# Altium footprint library SOMs.PcbLib: 40 footprints (part 2 of 3)
Each footprint in its own frame and in the unit in brackets; x right, y up, seen from the top. Pads: shape width x height; smd on the part's side, far side on the other; paste and mask are expansions set on the pad; w line width, h text height; cw(c..) or ccw(c..) is an arc to the next point about the centre after c.
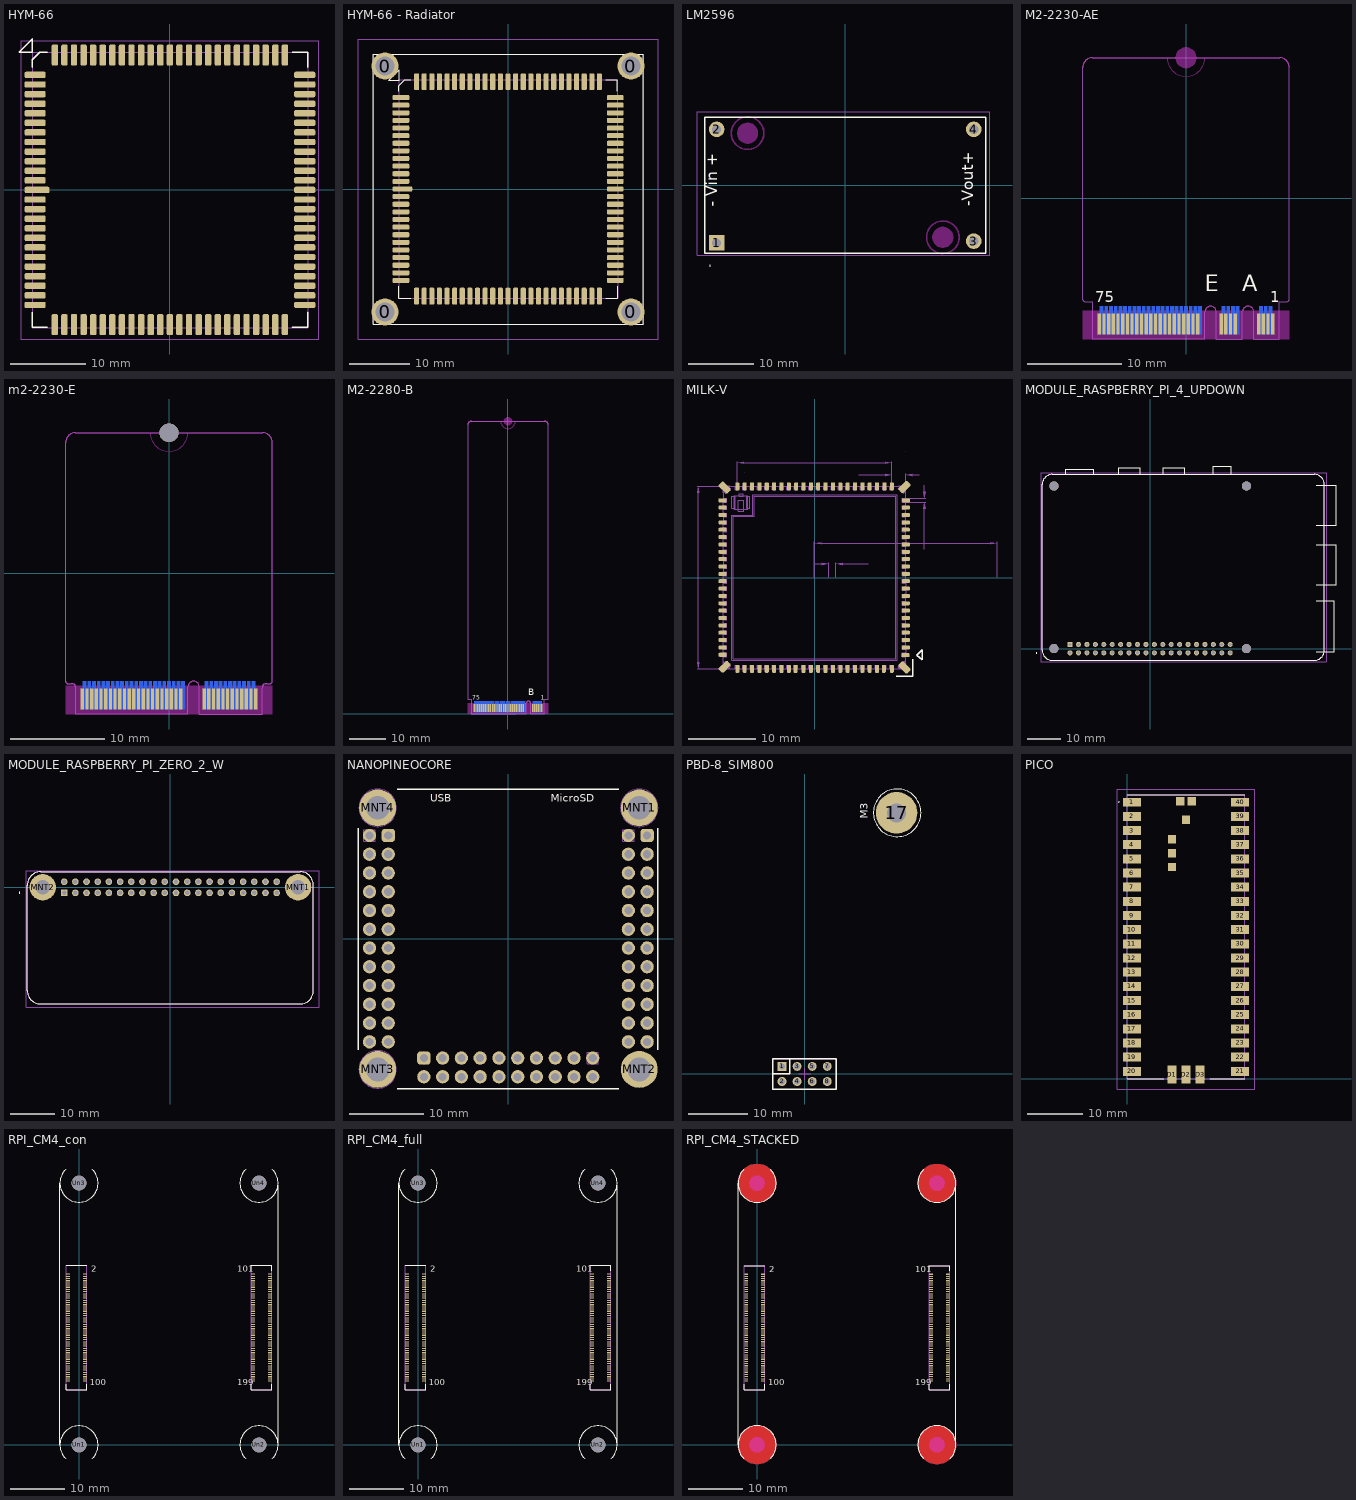
[diagram p1: the footprints below, top view; thin cyan lines are the x and y axes]

## HYM-66 [mm]
height 3.8
pads (100):
  rrect50% 3.3x0.85 smd: 1(-17.6,0)
  rrect50% 2.8x0.85 smd: 2(-17.85,-1.27) 3(-17.85,-2.54) 4(-17.85,-3.81) 5(-17.85,-5.08) 6(-17.85,-6.35) 7(-17.85,-7.62) 8(-17.85,-8.89) 9(-17.85,-10.16) 10(-17.85,-11.43) 11(-17.85,-12.7) 12(-17.85,-13.97) 13(-17.85,-15.24) 39(17.875,-15.24) 40(17.875,-13.97) 41(17.875,-12.7) 42(17.875,-11.43) 43(17.875,-10.16) 44(17.875,-8.89) 45(17.875,-7.62) 46(17.875,-6.35) 47(17.875,-5.08) 48(17.875,-3.81) 49(17.875,-2.54) 50(17.875,-1.27) 51(17.875,0) 52(17.875,1.27) 53(17.875,2.54) 54(17.875,3.81) 55(17.875,5.08) 56(17.875,6.35) 57(17.875,7.62) 58(17.875,8.89) 59(17.875,10.16) 60(17.875,11.43) 61(17.875,12.7) 62(17.875,13.97) 63(17.875,15.24) 89(-17.85,15.24) 90(-17.85,13.97) 91(-17.85,12.7) 92(-17.85,11.43) 93(-17.85,10.16) 94(-17.85,8.89) 95(-17.85,7.62) 96(-17.85,6.35) 97(-17.85,5.08) 98(-17.85,3.81) 99(-17.85,2.54) 100(-17.85,1.27)
  rrect50% 0.85x2.8 smd: 14(-15.24,-17.85) 15(-13.97,-17.85) 16(-12.7,-17.85) 17(-11.43,-17.85) 18(-10.16,-17.85) 19(-8.89,-17.85) 20(-7.62,-17.85) 21(-6.35,-17.85) 22(-5.08,-17.85) 23(-3.81,-17.85) 24(-2.54,-17.85) 25(-1.27,-17.85) 26(0,-17.85) 27(1.27,-17.85) 28(2.54,-17.85) 29(3.81,-17.85) 30(5.08,-17.85) 31(6.35,-17.85) 32(7.62,-17.85) 33(8.89,-17.85) 34(10.16,-17.85) 35(11.43,-17.85) 36(12.7,-17.85) 37(13.97,-17.85) 38(15.24,-17.85) 64(15.24,17.875) 65(13.97,17.875) 66(12.7,17.875) 67(11.43,17.875) 68(10.16,17.875) 69(8.89,17.875) 70(7.62,17.875) 71(6.35,17.875) 72(5.08,17.875) 73(3.81,17.875) 74(2.54,17.875) 75(1.27,17.875) 76(0,17.875) 77(-1.27,17.875) 78(-2.54,17.875) 79(-3.81,17.875) 80(-5.08,17.875) 81(-6.35,17.875) 82(-7.62,17.875) 83(-8.89,17.875) 84(-10.16,17.875) 85(-11.43,17.875) 86(-12.7,17.875) 87(-13.97,17.875) 88(-15.24,17.875)
Top Overlay:
  lines w0.2: -18.225,-16.225 -18.225,-18.225 -16.225,-18.225 ; -18.225,16.275 -18.225,17.25 -17.225,18.25 -16.25,18.25 ; 16.25,-18.225 18.25,-18.225 18.25,-16.225 ; 16.25,18.25 18.25,18.25 18.25,16.25 ; -19.975,18.25 -18.225,20 -18.225,18.25 -19.975,18.25
Top Assembly:
  lines w0.1: -18.25,-18.25 18.25,-18.25 18.25,18.25 -18.25,18.25 -18.25,-18.25
Top Courtyard:
  lines w0.1: -19.75,-19.75 19.75,-19.75 19.75,19.75 -19.75,19.75 -19.75,-19.75

## HYM-66 - Radiator [mm]
height 3.8
pads (104):
  round 4.5 hole 3.2: 0(-20.5,-20.5) 0(-20.5,20.5) 0(20.5,-20.5) 0(20.5,20.5)
  rrect50% 3.3x0.85 smd: 1(-17.6,0)
  rrect50% 2.8x0.85 smd: 2(-17.85,-1.27) 3(-17.85,-2.54) 4(-17.85,-3.81) 5(-17.85,-5.08) 6(-17.85,-6.35) 7(-17.85,-7.62) 8(-17.85,-8.89) 9(-17.85,-10.16) 10(-17.85,-11.43) 11(-17.85,-12.7) 12(-17.85,-13.97) 13(-17.85,-15.24) 39(17.875,-15.24) 40(17.875,-13.97) 41(17.875,-12.7) 42(17.875,-11.43) 43(17.875,-10.16) 44(17.875,-8.89) 45(17.875,-7.62) 46(17.875,-6.35) 47(17.875,-5.08) 48(17.875,-3.81) 49(17.875,-2.54) 50(17.875,-1.27) 51(17.875,0) 52(17.875,1.27) 53(17.875,2.54) 54(17.875,3.81) 55(17.875,5.08) 56(17.875,6.35) 57(17.875,7.62) 58(17.875,8.89) 59(17.875,10.16) 60(17.875,11.43) 61(17.875,12.7) 62(17.875,13.97) 63(17.875,15.24) 89(-17.85,15.24) 90(-17.85,13.97) 91(-17.85,12.7) 92(-17.85,11.43) 93(-17.85,10.16) 94(-17.85,8.89) 95(-17.85,7.62) 96(-17.85,6.35) 97(-17.85,5.08) 98(-17.85,3.81) 99(-17.85,2.54) 100(-17.85,1.27)
  rrect50% 0.85x2.8 smd: 14(-15.24,-17.85) 15(-13.97,-17.85) 16(-12.7,-17.85) 17(-11.43,-17.85) 18(-10.16,-17.85) 19(-8.89,-17.85) 20(-7.62,-17.85) 21(-6.35,-17.85) 22(-5.08,-17.85) 23(-3.81,-17.85) 24(-2.54,-17.85) 25(-1.27,-17.85) 26(0,-17.85) 27(1.27,-17.85) 28(2.54,-17.85) 29(3.81,-17.85) 30(5.08,-17.85) 31(6.35,-17.85) 32(7.62,-17.85) 33(8.89,-17.85) 34(10.16,-17.85) 35(11.43,-17.85) 36(12.7,-17.85) 37(13.97,-17.85) 38(15.24,-17.85) 64(15.24,17.875) 65(13.97,17.875) 66(12.7,17.875) 67(11.43,17.875) 68(10.16,17.875) 69(8.89,17.875) 70(7.62,17.875) 71(6.35,17.875) 72(5.08,17.875) 73(3.81,17.875) 74(2.54,17.875) 75(1.27,17.875) 76(0,17.875) 77(-1.27,17.875) 78(-2.54,17.875) 79(-3.81,17.875) 80(-5.08,17.875) 81(-6.35,17.875) 82(-7.62,17.875) 83(-8.89,17.875) 84(-10.16,17.875) 85(-11.43,17.875) 86(-12.7,17.875) 87(-13.97,17.875) 88(-15.24,17.875)
Top Overlay:
  lines w0.2: -18.225,-16.225 -18.225,-18.225 -16.225,-18.225 ; -18.225,16.275 -18.225,17.25 -17.225,18.25 -16.25,18.25 ; 16.25,-18.225 18.25,-18.225 18.25,-16.225 ; 16.25,18.25 18.25,18.25 18.25,16.25 ; -22.5,-22.5 22.5,-22.5 22.5,22.5 -22.5,22.5 -22.5,-22.5 ; -19.875,18.15 -18.125,19.9 -18.125,18.15 -19.875,18.15
Top Assembly:
  lines w0.1: -25,-25 -25,25 25,25 25,-25 -25,-25 ; -18.25,-18.25 18.25,-18.25 18.25,18.25 -18.25,18.25 -18.25,-18.25
  text "50x50 FAN" at 17.83,23.343 h2
Top Courtyard:
  lines w0.1: -22.5,-22.5 22.5,-22.5 22.5,22.5 -22.5,22.5 -22.5,-22.5

## LM2596 [mm] "DC-DC Module, 3A"
height 9
pads (4):
  rect 2.4x2.4 hole 1.4: 1(-19.75,-8.858)
  round 2.4 hole 1.4: 2(-19.75,8.58) 3(19.75,-8.58) 4(19.75,8.58)
Top Overlay:
  lines w0.1: -20.77,-12.43 ccw(c-20.77,-12.38) -20.77,-12.33 ccw(c-20.77,-12.38) -20.77,-12.43
  lines w0.2: -21.6,-10.414 -21.6,10.414 21.6,10.414 21.6,-10.414 -21.6,-10.414
  text "-Vout+" at 20.32,-3.213 h3
  text "- Vin +" at -19.05,-3.284 h3
Keep-Out Layer:
  board cut-out: -15,6.4 -15.158,6.4 -15.467,6.461 -15.758,6.582 -16.02,6.757 -16.243,6.98 -16.418,7.242 -16.539,7.533 -16.6,7.842 -16.6,8 -16.6,8.158 -16.539,8.467 -16.418,8.758 -16.243,9.02 -16.02,9.243 -15.758,9.418 -15.467,9.539 -15.158,9.6 -15,9.6 -14.842,9.6 -14.533,9.539 -14.242,9.418 -13.98,9.243 -13.757,9.02 -13.582,8.758 -13.461,8.467 -13.4,8.158 -13.4,8 -13.4,7.842 -13.461,7.533 -13.582,7.242 -13.757,6.98 -13.98,6.757 -14.242,6.582 -14.533,6.461 -14.842,6.4
  board cut-out: 15,-9.6 14.842,-9.6 14.533,-9.539 14.242,-9.418 13.98,-9.243 13.757,-9.02 13.582,-8.758 13.461,-8.467 13.4,-8.158 13.4,-8 13.4,-7.842 13.461,-7.533 13.582,-7.242 13.757,-6.98 13.98,-6.757 14.242,-6.582 14.533,-6.461 14.842,-6.4 15,-6.4 15.158,-6.4 15.467,-6.461 15.758,-6.582 16.02,-6.757 16.243,-6.98 16.418,-7.242 16.539,-7.533 16.6,-7.842 16.6,-8 16.6,-8.158 16.539,-8.467 16.418,-8.758 16.243,-9.02 16.02,-9.243 15.758,-9.418 15.467,-9.539 15.158,-9.6
Keep-Out Layer:
  circle w0.254: c-15,8 r2.5
  circle w0.254: c15,-8 r2.5
Mechanical 13:
  lines w0.1: 14.79,11.27 -22.77,11.27 -22.77,-10.73 22.24,-10.73 ; 22.23,-10.73 22.23,11.27
Mechanical 15:
  lines w0.1: 22.23,-10.73 22.23,10.28 22.23,10.27 22.23,11.27 -22.77,11.27 -22.77,-10.73 22.24,-10.73
3D body "LM2596 DC to DC Buck Converter 3 A.STEP": height 13.35, standoff -1.8, extent -21.6,-10.625 21.6,10.625

## M2-2230-AE [mm] "UNTESTED m.2 2230 type E"
height 3
pads (59):
  rect 0.35x2.2 smd: 1(9.25,-13.4) 3(8.75,-13.4) 5(8.25,-13.4) 7(7.75,-13.4) 17(5.25,-13.4) 19(4.75,-13.4) 21(4.25,-13.4) 23(3.75,-13.4) 33(1.25,-13.4) 35(0.75,-13.4) 37(0.25,-13.4) 39(-0.25,-13.4) 41(-0.75,-13.4) 43(-1.25,-13.4) 45(-1.75,-13.4) 47(-2.25,-13.4) 49(-2.75,-13.4) 51(-3.25,-13.4) 53(-3.75,-13.4) 55(-4.25,-13.4) 57(-4.75,-13.4) 59(-5.25,-13.4) 61(-5.75,-13.4) 63(-6.25,-13.4) 65(-6.75,-13.4) 67(-7.25,-13.4) 69(-7.75,-13.4) 71(-8.25,-13.4) 73(-8.75,-13.4) 75(-9.25,-13.4)
  rect 0.35x3 smd far side: 2(9,-13) 4(8.5,-13) 6(8,-13) 16(5.5,-13) 18(5,-13) 20(4.5,-13) 22(4,-13) 32(1.5,-13) 34(1,-13) 36(0.5,-13) 38(0,-13) 40(-0.5,-13) 42(-1,-13) 44(-1.5,-13) 46(-2,-13) 48(-2.5,-13) 50(-3,-13) 52(-3.5,-13) 54(-4,-13) 56(-4.5,-13) 58(-5,-13) 60(-5.5,-13) 62(-6,-13) 64(-6.5,-13) 66(-7,-13) 68(-7.5,-13) 70(-8,-13) 72(-8.5,-13) 74(-9,-13)
Top Overlay:
  text "75" at -9.7,-11.5 h2
  text "1" at 9,-11.5 h2
  text "E" at 2,-10.5 h3
  text "A" at 6,-10.5 h3
Top Solder:
  region: -11,-15 -11,-12 11,-12 11,-15
  region: 2.025,-15 -9.925,-15 -9.925,-14.7 2.025,-14.7
  region: 9.925,-15 3.225,-15 3.225,-14.7 9.925,-14.7
Bottom Solder:
  region: -11,-15 -11,-12 11,-12 11,-15
  region: 2.025,-15 -9.925,-15 -9.925,-14.7 2.025,-14.7
  region: 9.925,-15 3.225,-15 3.225,-14.7 9.925,-14.7
Keep-Out Layer:
  board cut-out: 0,13.9 -0.108,13.9 -0.321,13.942 -0.521,14.025 -0.701,14.146 -0.854,14.299 -0.975,14.479 -1.058,14.679 -1.1,14.892 -1.1,15 -1.1,15.108 -1.058,15.321 -0.975,15.521 -0.854,15.701 -0.701,15.854 -0.521,15.975 -0.321,16.058 -0.108,16.1 0,16.1 0.108,16.1 0.321,16.058 0.521,15.975 0.701,15.854 0.854,15.701 0.975,15.521 1.058,15.321 1.1,15.108 1.1,15 1.1,14.892 1.058,14.679 0.975,14.479 0.854,14.299 0.701,14.146 0.521,14.025 0.321,13.942 0.108,13.9
Keep-Out Layer:
  region: -11,-12 11,-12 11,-15 -11,-15
  lines w0.1: -11,14 cw(c-10,14) -10,15 0,15 10,15 cw(c10,14) 11,14 ; -9.925,-12.25 -9.925,-15 2.025,-15 2.025,-12.1 cw(c2.625,-12.1) 3.225,-12.1 3.225,-15 ; -2,15 ccw(c0,15) 2,15 ; 6.025,-15 6.025,-12.1 cw(c6.625,-12.1) 7.225,-12.1 7.225,-15 ; 9.925,-15 9.925,-12.25
Mechanical 1:
  lines w0.1: -11,-10.8 ccw(c-10.8,-10.8) -10.8,-11 -9.925,-11 -9.925,-15 2.025,-15 2.025,-12.1 cw(c2.625,-12.1) 3.225,-12.1 3.225,-15 6.025,-15 6.025,-12.1 cw(c6.625,-12.1) 7.225,-12.1 7.225,-15 9.925,-15 9.925,-11 10.8,-11 ccw(c10.8,-10.8) 11,-10.8 11,14 ccw(c10,14) 10,15 0,15 -10,15 ccw(c-10,14) -11,14 -11,-10.8

## m2-2230-E [mm] "UNTESTED m.2 2230 type E"
height 3
pads (67):
  rect 0.35x2.2 smd: 1(9.25,-13.4) 3(8.75,-13.4) 5(8.25,-13.4) 7(7.75,-13.4) 9(7.25,-13.4) 11(6.75,-13.4) 13(6.25,-13.4) 15(5.75,-13.4) 17(5.25,-13.4) 19(4.75,-13.4) 21(4.25,-13.4) 23(3.75,-13.4) 33(1.25,-13.4) 35(0.75,-13.4) 37(0.25,-13.4) 39(-0.25,-13.4) 41(-0.75,-13.4) 43(-1.25,-13.4) 45(-1.75,-13.4) 47(-2.25,-13.4) 49(-2.75,-13.4) 51(-3.25,-13.4) 53(-3.75,-13.4) 55(-4.25,-13.4) 57(-4.75,-13.4) 59(-5.25,-13.4) 61(-5.75,-13.4) 63(-6.25,-13.4) 65(-6.75,-13.4) 67(-7.25,-13.4) 69(-7.75,-13.4) 71(-8.25,-13.4) 73(-8.75,-13.4) 75(-9.25,-13.4)
  rect 0.35x3 smd far side: 2(9,-13) 4(8.5,-13) 6(8,-13) 8(7.5,-13) 10(7,-13) 12(6.5,-13) 14(6,-13) 16(5.5,-13) 18(5,-13) 20(4.5,-13) 22(4,-13) 32(1.5,-13) 34(1,-13) 36(0.5,-13) 38(0,-13) 40(-0.5,-13) 42(-1,-13) 44(-1.5,-13) 46(-2,-13) 48(-2.5,-13) 50(-3,-13) 52(-3.5,-13) 54(-4,-13) 56(-4.5,-13) 58(-5,-13) 60(-5.5,-13) 62(-6,-13) 64(-6.5,-13) 66(-7,-13) 68(-7.5,-13) 70(-8,-13) 72(-8.5,-13) 74(-9,-13)
via 0,15 diameter 2 hole 2
Top Solder:
  region: -11,-15 -11,-12 11,-12 11,-15
  region: 2.025,-15 -9.925,-15 -9.925,-14.7 2.025,-14.7
  region: 9.925,-15 3.225,-15 3.225,-14.7 9.925,-14.7
Bottom Solder:
  region: -11,-15 -11,-12 11,-12 11,-15
  region: 2.025,-15 -9.925,-15 -9.925,-14.7 2.025,-14.7
  region: 9.925,-15 3.225,-15 3.225,-14.7 9.925,-14.7
Keep-Out Layer:
  region: -11,-12 11,-12 11,-15 -11,-15
  lines w0.1: -2,15 ccw(c0,15) 2,15 ; -11,-11.55 ccw(c-10.8,-11.55) -10.8,-11.75 -10.425,-11.75 cw(c-10.425,-12.25) -9.925,-12.25 -9.925,-15 2.025,-15 2.025,-12.1 cw(c2.625,-12.1) 3.225,-12.1 3.225,-15 9.925,-15 9.925,-12.25 cw(c10.425,-12.25) 10.425,-11.75 10.8,-11.75 ccw(c10.8,-11.55) 11,-11.55 11,14 ccw(c10,14) 10,15 0,15 -10,15 ccw(c-10,14) -11,14 -11,-11.55
Mechanical 1:
  lines w0.1: -11,-11.55 ccw(c-10.8,-11.55) -10.8,-11.75 -10.425,-11.75 cw(c-10.425,-12.25) -9.925,-12.25 -9.925,-15 2.025,-15 2.025,-12.1 cw(c2.625,-12.1) 3.225,-12.1 3.225,-15 9.925,-15 9.925,-12.25 cw(c10.425,-12.25) 10.425,-11.75 10.8,-11.75 ccw(c10.8,-11.55) 11,-11.55 11,14 ccw(c10,14) 10,15 0,15 -10,15 ccw(c-10,14) -11,14 -11,-11.55

## M2-2280-B [mm] "m.2 2280 type B"
height 3
pads (67):
  rect 0.35x2.2 smd: 1(9.25,1.6) 3(8.75,1.6) 5(8.25,1.6) 7(7.75,1.6) 9(7.25,1.6) 11(6.75,1.6) 21(4.25,1.6) 23(3.75,1.6) 25(3.25,1.6) 27(2.75,1.6) 29(2.25,1.6) 31(1.75,1.6) 33(1.25,1.6) 35(0.75,1.6) 37(0.25,1.6) 39(-0.25,1.6) 41(-0.75,1.6) 43(-1.25,1.6) 45(-1.75,1.6) 47(-2.25,1.6) 49(-2.75,1.6) 51(-3.25,1.6) 53(-3.75,1.6) 55(-4.25,1.6) 57(-4.75,1.6) 59(-5.25,1.6) 61(-5.75,1.6) 63(-6.25,1.6) 65(-6.75,1.6) 67(-7.25,1.6) 69(-7.75,1.6) 71(-8.25,1.6) 73(-8.75,1.6) 75(-9.25,1.6)
  rect 0.35x3 smd far side: 2(9,2) 4(8.5,2) 6(8,2) 8(7.5,2) 10(7,2) 20(4.5,2) 22(4,2) 24(3.5,2) 26(3,2) 28(2.5,2) 30(2,2) 32(1.5,2) 34(1,2) 36(0.5,2) 38(0,2) 40(-0.5,2) 42(-1,2) 44(-1.5,2) 46(-2,2) 48(-2.5,2) 50(-3,2) 52(-3.5,2) 54(-4,2) 56(-4.5,2) 58(-5,2) 60(-5.5,2) 62(-6,2) 64(-6.5,2) 66(-7,2) 68(-7.5,2) 70(-8,2) 72(-8.5,2) 74(-9,2)
Top Overlay:
  text "B" at 5.5,4.5 h3
  text "1" at 9,3.5 h2
  text "75" at -9.7,3.5 h2
Top Solder:
  region: 9.925,0 3.225,0 3.225,0.3 9.925,0.3
  region: 2.025,0 -9.925,0 -9.925,0.3 2.025,0.3
  region: -11,0 -11,3 11,3 11,0
Bottom Solder:
  region: 9.925,0 3.225,0 3.225,0.3 9.925,0.3
  region: 2.025,0 -9.925,0 -9.925,0.3 2.025,0.3
  region: -11,0 -11,3 11,3 11,0
Keep-Out Layer:
  board cut-out: 0,78.9 -0.108,78.9 -0.321,78.942 -0.521,79.025 -0.701,79.146 -0.854,79.299 -0.975,79.479 -1.058,79.679 -1.1,79.892 -1.1,80 -1.1,80.108 -1.058,80.321 -0.975,80.521 -0.854,80.701 -0.701,80.854 -0.521,80.975 -0.321,81.058 -0.108,81.1 0,81.1 0.108,81.1 0.321,81.058 0.521,80.975 0.701,80.854 0.854,80.701 0.975,80.521 1.058,80.321 1.1,80.108 1.1,80 1.1,79.892 1.058,79.679 0.975,79.479 0.854,79.299 0.701,79.146 0.521,79.025 0.321,78.942 0.108,78.9
Keep-Out Layer:
  region: -11,3 11,3 11,0 -11,0
  lines w0.1: -11,79 cw(c-10,79) -10,80 0,80 10,80 cw(c10,79) 11,79 ; -9.925,2.75 -9.925,0 2.025,0 ; -2,80 ccw(c0,80) 2,80 ; 9.925,0 9.925,2.75 ; 5.025,2.9 cw(c5.625,2.9) 6.225,2.9 ; 5.025,2.9 cw(c5.625,2.9) 6.225,2.9 ; 5.025,2.9 5.025,0 5.025,2.9 ; 6.225,2.9 6.225,0 6.225,2.9
Top Assembly:
  lines w0.1: -11,79 -11,4.2 ccw(c-10.8,4.2) -10.8,4 -9.925,4 -9.925,0 2.025,0 5.025,0 5.025,2.9 cw(c5.625,2.9) 6.225,2.9 6.225,0 9.925,0 9.925,4 10.8,4 ccw(c10.8,4.2) 11,4.2 11,79 ; -10.991,79 cw(c-9.991,79) -9.991,80 ; -10,80 10,80 ; 10.009,80 cw(c10.009,79) 11.009,79

## MILK-V [mm]
pads (92):
  rrect50% 1.2x0.6 smd: 1(13.6,-11.6) 2(13.65,-10.45) 3(13.65,-9.35) 4(13.65,-8.25) 5(13.65,-7.15) 6(13.65,-6.05) 7(13.65,-4.95) 8(13.65,-3.85) 9(13.65,-2.75) 10(13.65,-1.65) 11(13.65,-0.55) 12(13.65,0.55) 13(13.65,1.65) 14(13.65,2.75) 15(13.65,3.85) 16(13.65,4.95) 17(13.65,6.05) 18(13.65,7.15) 19(13.65,8.25) 20(13.65,9.35) 21(13.65,10.45) 22(13.65,11.55) 45(-13.75,11.55) 46(-13.75,10.45) 47(-13.75,9.35) 48(-13.75,8.25) 49(-13.75,7.15) 50(-13.75,6.05) 51(-13.75,4.95) 52(-13.75,3.85) 53(-13.75,2.75) 54(-13.75,1.65) 55(-13.75,0.55) 56(-13.75,-0.55) 57(-13.75,-1.65) 58(-13.75,-2.75) 59(-13.75,-3.85) 60(-13.75,-4.95) 61(-13.75,-6.05) 62(-13.75,-7.15) 63(-13.75,-8.25) 64(-13.75,-9.35) 65(-13.75,-10.45) 66(-13.75,-11.55)
  rrect50% 0.6x1.2 smd: 23(11.55,13.65) 24(10.45,13.65) 25(9.35,13.65) 26(8.25,13.65) 27(7.15,13.65) 28(6.05,13.65) 29(4.95,13.65) 30(3.85,13.65) 31(2.75,13.65) 32(1.65,13.65) 33(0.55,13.65) 34(-0.55,13.65) 35(-1.65,13.65) 36(-2.75,13.65) 37(-3.85,13.65) 38(-4.95,13.65) 39(-6.05,13.65) 40(-7.15,13.65) 41(-8.25,13.65) 42(-9.35,13.65) 43(-10.45,13.65) 44(-11.55,13.65) 67(-11.55,-13.65) 68(-10.45,-13.65) 69(-9.35,-13.65) 70(-8.25,-13.65) 71(-7.15,-13.65) 72(-6.05,-13.65) 73(-4.95,-13.65) 74(-3.85,-13.65) 75(-2.85,-13.65) 76(-1.65,-13.65) 77(-0.55,-13.65) 78(0.55,-13.65) 79(1.65,-13.65) 80(2.75,-13.65) 81(3.85,-13.65) 82(4.95,-13.65) 83(6.05,-13.65) 84(7.15,-13.65) 85(8.25,-13.65) 86(9.35,-13.65) 87(10.35,-13.65) 88(11.55,-13.65)
  rrect50% 1.83x1 smd rot 135: 89(13.45,-13.45) 91(-13.45,13.45)
  rrect50% 1.83x1 smd rot 45: 90(13.45,13.55) 92(-13.45,-13.35)
Top Overlay:
  lines w0.2: 12.25,-14.75 14.65,-14.75 14.65,-12.25 ; 15.3,-11.6 16.1,-12.3 16.1,-10.8 15.3,-11.6
Mechanical 1:
  region: 27.287,5.145 26.287,4.979 26.287,5.312
  region: 0.987,4.979 -0.013,5.145 0.987,5.312
  region: 4.187,1.874 3.187,2.041 4.187,2.207
  region: 2.087,2.041 1.087,1.874 1.087,2.207
  lines w0.013: -0.013,0.067 -0.013,5.325 ; 0.087,2.041 1.087,2.041 ; 0.987,5.145 26.287,5.145 ; 2.087,0.067 2.087,2.221 ; 3.187,0.067 3.187,2.221 ; 4.187,2.041 7.993,2.041 ; 27.287,0.067 27.287,5.325
  text "0.1）}" at 7.286,5.372 h1
  text "1.10" at 5.278,2.131 h1
Top Assembly:
  lines w0.2: -13.65,-12.6 -13.65,-13.6 -12.65,-13.6 ; -13.65,12.65 -13.65,13.65 -12.65,13.65 ; 12.55,-13.55 13.55,-12.55 ; 12.6,-13.6 13.6,-13.6 13.6,-12.6 ; 12.6,13.65 13.6,13.65 13.6,12.65
Top Designator:
  drawing of 301 lines, arcs and shapes, not listed
Top Courtyard:
  circle w0.006: c-17.403,-13.645 r0.003
  circle w0.006: c-13.663,13.655 r0.003
  circle w0.006: c-10.463,13.655 r0.003
  circle w0.006: c-11.563,13.655 r0.003
  circle w0.006: c-11.563,13.655 r0.003
  circle w0.006: c-13.655,-13.613 r0.003
  circle w0.006: c-13.655,-13.613 r0.003
  circle w0.006: c-13.663,-13.645 r0.003
  circle w0.006: c-13.663,13.655 r0.003
  circle w0.006: c13.637,13.655 r0.003
  circle w0.006: c11.537,13.655 r0.003
  circle w0.006: c13.637,18.795 r0.003
  circle w0.006: c13.637,13.655 r0.003
  circle w0.006: c13.637,11.83 r0.003
  circle w0.006: c13.613,-13.605 r0.003
  circle w0.006: c13.605,13.663 r0.003
  circle w0.006: c13.605,13.663 r0.003
  circle w0.006: c11.537,13.655 r0.003
  circle w0.006: c13.613,-13.605 r0.003
  circle w0.006: c13.637,11.28 r0.003
Dimensions (Mech31):
  drawing of 222 lines, arcs and shapes, not listed
  text "2.10" at 6.733,15.442 h1
  text "23.10" at -1.727,17.24 h1
  text "1" at 12.797,-11.786 h0.6
3D body: height 2.5, standoff 0, extent -13.6,-13.5 13.5,13.6

## MODULE_RASPBERRY_PI_4_UPDOWN [mm]
pads (44):
  rect 1.508x1.508 / inner round 1.508 / far side rect 1.508x1.508 hole 1: 1(-24.13,1.27)
  round 1.508 hole 1: 2(-24.13,-1.27) 3(-21.59,1.27) 4(-21.59,-1.27) 5(-19.05,1.27) 6(-19.05,-1.27) 7(-16.51,1.27) 8(-16.51,-1.27) 9(-13.97,1.27) 10(-13.97,-1.27) 11(-11.43,1.27) 12(-11.43,-1.27) 13(-8.89,1.27) 14(-8.89,-1.27) 15(-6.35,1.27) 16(-6.35,-1.27) 17(-3.81,1.27) 18(-3.81,-1.27) 19(-1.27,1.27) 20(-1.27,-1.27) 21(1.27,1.27) 22(1.27,-1.27) 23(3.81,1.27) 24(3.81,-1.27) 25(6.35,1.27) 26(6.35,-1.27) 27(8.89,1.27) 28(8.89,-1.27) 29(11.43,1.27) 30(11.43,-1.27) 31(13.97,1.27) 32(13.97,-1.27) 33(16.51,1.27) 34(16.51,-1.27) 35(19.05,1.27) 36(19.05,-1.27) 37(21.59,1.27) 38(21.59,-1.27) 39(24.13,1.27) 40(24.13,-1.27)
  round 2.75 hole 2.75 unplated: ""(-29,0) ""(-29,49) ""(29,0) ""(29,49)
Top Overlay:
  circle w0.2: c-34.29,-1.27 r0.1
  lines w0.127: -32.5,-0.5 ccw(c-29.5,-0.5) -29.5,-3.5 49.5,-3.5 ccw(c49.5,-0.5) 52.5,-0.5 52.5,49.5 ccw(c49.5,49.5) 49.5,52.5 -29.5,52.5 ccw(c-29.5,49.5) -32.5,49.5 -32.5,-0.5
  lines w0.15: -25.5,52.5 -25.5,54 -17,54 -17,52.5 ; -9.5,52.5 -9.5,54.5 -3,54.5 -3,52.5 ; 4,52.5 4,54.5 10.5,54.5 10.5,52.5 ; 19,52.5 19,55 24.5,55 24.5,52.5 ; 50,-1 55.5,-1 55.5,14.5 50,14.5 ; 50,19.25 56,19.25 56,31.25 50,31.25 ; 50,37.25 56,37.25 56,49.25 50,49.25
Top Assembly:
  lines w0.127: 52.5,-0.5 cw(c49.5,-0.5) 49.5,-3.5 -29.5,-3.5 cw(c-29.5,-0.5) -32.5,-0.5 -32.5,49.5 cw(c-29.5,49.5) -29.5,52.5 49.5,52.5 cw(c49.5,49.5) 52.5,49.5 52.5,0
Top Courtyard:
  lines w0.05: -33,-4 53,-4 53,53 -33,53 -33,-4
3D body "Raspberry Pi 4 Model B.STEP": height 14.9, standoff -5, extent -32.5,-3.5 56.49,54.9

## MODULE_RASPBERRY_PI_ZERO_2_W [mm]
pads (42):
  rect 1.508x1.508 / inner round 1.508 / far side rect 1.508x1.508 hole 1: 1(-24.13,-1.27)
  round 1.508 hole 1: 2(-24.13,1.27) 3(-21.59,-1.27) 4(-21.59,1.27) 5(-19.05,-1.27) 6(-19.05,1.27) 7(-16.51,-1.27) 8(-16.51,1.27) 9(-13.97,-1.27) 10(-13.97,1.27) 11(-11.43,-1.27) 12(-11.43,1.27) 13(-8.89,-1.27) 14(-8.89,1.27) 15(-6.35,-1.27) 16(-6.35,1.27) 17(-3.81,-1.27) 18(-3.81,1.27) 19(-1.27,-1.27) 20(-1.27,1.27) 21(1.27,-1.27) 22(1.27,1.27) 23(3.81,-1.27) 24(3.81,1.27) 25(6.35,-1.27) 26(6.35,1.27) 27(8.89,-1.27) 28(8.89,1.27) 29(11.43,-1.27) 30(11.43,1.27) 31(13.97,-1.27) 32(13.97,1.27) 33(16.51,-1.27) 34(16.51,1.27) 35(19.05,-1.27) 36(19.05,1.27) 37(21.59,-1.27) 38(21.59,1.27) 39(24.13,-1.27) 40(24.13,1.27)
  round 6 hole 3.2 unplated: MNT1(29,0) MNT2(-29,0)
Top Overlay:
  circle w0.2: c-34.29,-1.27 r0.1
  lines w0.127: 4.4,-26.5 12.75,-26.5 ; 17,-26.5 25.35,-26.5 ; -32.5,-23.5 ccw(c-29.5,-23.5) -29.5,-26.5 29.5,-26.5 ccw(c29.5,-23.5) 32.5,-23.5 32.5,0.5 ccw(c29.5,0.5) 29.5,3.5 -29.5,3.5 ccw(c-29.5,0.5) -32.5,0.5 -32.5,-23.5
Mechanical 13:
  circle w0.2: c-34.29,-1.27 r0.1
  lines w0.127: 4.4,-26.5 12.75,-26.5 ; 17,-26.5 25.35,-26.5 ; -32.5,-23.5 ccw(c-29.5,-23.5) -29.5,-26.5 29.5,-26.5 ccw(c29.5,-23.5) 32.5,-23.5 32.5,0.5 ccw(c29.5,0.5) 29.5,3.5 -29.5,3.5 ccw(c-29.5,0.5) -32.5,0.5 -32.5,-23.5
Mechanical 15:
  lines w0.05: -32.75,-27.25 33.75,-27.25 33.75,3.75 -32.75,3.75 -32.75,-27.25
3D body "Raspberry Pi Zero 2 W_cut.STEP": height 11.25, standoff -0.34, extent -32.5,-26.5 33.3,3.5

## NANOPINEOCORE [mm]
pads (72):
  rrect50% 1.8x1.8 hole 1.1: 101(-16.26,13.97) 201(-11.45,-16.16) 301(18.77,13.97)
  round 1.8 hole 1.1: 102(-18.8,13.97) 103(-16.26,11.43) 104(-18.8,11.43) 105(-16.26,8.89) 106(-18.8,8.89) 107(-16.26,6.35) 108(-18.8,6.35) 109(-16.26,3.81) 110(-18.8,3.81) 111(-16.26,1.27) 112(-18.8,1.27) 113(-16.26,-1.27) 114(-18.8,-1.27) 115(-16.26,-3.81) 116(-18.8,-3.81) 117(-16.26,-6.35) 118(-18.8,-6.35) 119(-16.26,-8.89) 120(-18.8,-8.89) 121(-16.26,-11.43) 122(-18.8,-11.43) 123(-16.26,-13.97) 124(-18.8,-13.97) 202(-11.45,-18.7) 203(-8.91,-16.16) 204(-8.91,-18.7) 205(-6.37,-16.16) 206(-6.37,-18.7) 207(-3.83,-16.16) 208(-3.83,-18.7) 209(-1.29,-16.16) 210(-1.29,-18.7) 211(1.25,-16.16) 212(1.25,-18.7) 213(3.79,-16.16) 214(3.79,-18.7) 215(6.33,-16.16) 216(6.33,-18.7) 217(8.87,-16.16) 218(8.87,-18.7) 219(11.41,-16.16) 220(11.41,-18.7) 302(16.23,13.97) 303(18.77,11.43) 304(16.23,11.43) 305(18.77,8.89) 306(16.23,8.89) 307(18.77,6.35) 308(16.23,6.35) 309(18.77,3.81) 310(16.23,3.81) 311(18.77,1.27) 312(16.23,1.27) 313(18.77,-1.27) 314(16.23,-1.27) 315(18.77,-3.81) 316(16.23,-3.81) 317(18.77,-6.35) 318(16.23,-6.35) 319(18.77,-8.89) 320(16.23,-8.89) 321(18.77,-11.43) 322(16.23,-11.43) 323(18.77,-13.97) 324(16.23,-13.97)
  round 5 hole 3.2 unplated: MNT1(17.7,17.7) MNT2(17.7,-17.7) MNT3(-17.7,-17.7) MNT4(-17.7,17.7)
Top Overlay:
  lines w0.2: -20.362,-15.048 -20.362,14.952 ; -15.062,-20.348 14.938,-20.348 ; -15.062,20.252 14.938,20.252 ; 20.238,-15.048 20.238,14.952
  text "MicroSD" at 5.717,18.113 h1.8
  text "USB" at -10.611,18.116 h1.8
Top Assembly:
  circle w0.05: c3.795,-16.165 r0.762
  circle w0.05: c-6.365,-18.705 r0.762
  circle w0.05: c-8.905,-18.705 r0.762
  circle w0.05: c-11.445,-18.705 r0.762
  circle w0.05: c1.255,-16.165 r0.762
  circle w0.05: c1.255,-18.705 r0.762
  circle w0.05: c3.795,-18.705 r0.762
  circle w0.05: c6.335,-18.705 r0.762
  circle w0.05: c-11.445,-16.165 r0.762
  circle w0.05: c-1.285,-16.165 r0.762
  circle w0.05: c-8.905,-16.165 r0.762
  circle w0.05: c-3.825,-16.165 r0.762
  circle w0.05: c-6.365,-16.165 r0.762
  circle w0.05: c6.335,-16.165 r0.762
  circle w0.05: c-3.825,-18.705 r0.762
  circle w0.05: c-1.285,-18.705 r0.762
  circle w0.05: c-17.7,17.7 r1.5
  circle w0.05: c-17.7,17.7 r2.54
  circle w0.05: c-18.8,8.89 r0.762
  circle w0.05: c-18.8,11.43 r0.762
  circle w0.05: c-16.26,11.43 r0.762
  circle w0.05: c-16.26,13.97 r0.762
  circle w0.05: c-16.26,8.89 r0.762
  circle w0.05: c-18.8,-11.43 r0.762
  circle w0.05: c-18.8,-13.97 r0.762
  circle w0.05: c-18.8,-8.89 r0.762
  circle w0.05: c-18.8,-6.35 r0.762
  circle w0.05: c-18.8,-3.81 r0.762
  circle w0.05: c-16.26,-13.97 r0.762
  circle w0.05: c-16.26,-11.43 r0.762
  circle w0.05: c-16.26,-8.89 r0.762
  circle w0.05: c-16.26,-6.35 r0.762
  circle w0.05: c-16.26,-3.81 r0.762
  circle w0.05: c-17.7,-17.7 r1.5
  circle w0.05: c-17.7,-17.7 r2.54
  circle w0.05: c18.77,-11.43 r0.762
  circle w0.05: c18.77,-6.35 r0.762
  circle w0.05: c16.23,-6.35 r0.762
  circle w0.05: c16.23,-8.89 r0.762
  circle w0.05: c18.77,-8.89 r0.762
  circle w0.05: c16.23,-11.43 r0.762
  circle w0.05: c18.77,11.43 r0.762
  circle w0.05: c17.7,17.7 r1.5
  circle w0.05: c17.7,17.7 r2.54
  circle w0.05: c18.77,13.97 r0.762
  circle w0.05: c16.23,11.43 r0.762
  circle w0.05: c16.23,1.27 r0.762
  circle w0.05: c18.77,3.81 r0.762
  circle w0.05: c16.23,3.81 r0.762
  circle w0.05: c16.23,6.35 r0.762
  circle w0.05: c16.23,8.89 r0.762
  circle w0.05: c18.77,-3.81 r0.762
  circle w0.05: c18.77,-1.27 r0.762
  circle w0.05: c18.77,1.27 r0.762
  circle w0.05: c18.77,6.35 r0.762
  circle w0.05: c18.77,8.89 r0.762
  circle w0.05: c16.23,-1.27 r0.762
  circle w0.05: c16.23,-3.81 r0.762
  circle w0.05: c11.415,-18.705 r0.762
  circle w0.3: c17.7,-17.7 r1.5
  circle w0.05: c18.77,-13.97 r0.762
  circle w0.05: c8.875,-16.165 r0.762
  circle w0.05: c16.23,-13.97 r0.762
  circle w0.05: c8.875,-18.705 r0.762
  circle w0.05: c-16.26,-1.27 r0.762
  circle w0.05: c-18.8,6.35 r0.762
  circle w0.05: c-18.8,1.27 r0.762
  circle w0.05: c-16.26,6.35 r0.762
  circle w0.05: c-18.8,3.81 r0.762
  circle w0.05: c-16.26,1.27 r0.762
  circle w0.05: c-16.26,3.81 r0.762
  circle w0.05: c-18.8,-1.27 r0.762
  lines w0.05: -19.562,13.208 -18.038,13.208 -18.038,14.732 -19.562,14.732 -19.562,13.208 ; 10.653,-16.927 10.653,-15.403 12.177,-15.403 12.177,-16.927 10.653,-16.927 ; 15.468,13.208 16.992,13.208 16.992,14.732 15.468,14.732 15.468,13.208
3D body "kicad_module_3D_nanoPi_NEO_Core_.step": height 13.2, standoff -2.95, extent -20.055,-20 20.055,22.471

## PBD-8_SIM800 [mm]
height 10
pads (9):
  rect 1.5x1.5 hole 1: 1(-3.81,1.27)
  round 1.5 hole 1: 2(-3.81,-1.27) 3(-1.27,1.27) 4(-1.27,-1.27) 5(1.27,1.27) 6(1.27,-1.27) 7(3.81,1.27) 8(3.81,-1.27)
  round 7 hole 3.2: 17(15.5,44)
Top Overlay:
  circle w0.1: c15.6,44 r4.011
  lines w0.25: -5.334,0 -2.54,0 ; -2.522,0.018 -2.522,2.54 ; -5.334,-2.54 -5.334,2.54 5.334,2.54 5.334,-2.54 -5.334,-2.54
  text "M3" at 11.026,43.014 h2.2
Mechanical 13:
  lines w0.1: -5.334,-2.54 5.334,-2.54 5.334,2.54 -5.334,2.54 -5.334,-2.54
Mechanical 15:
  lines w0.1: -0.984,0 1.016,0 ; 0,-1 0,1 ; -5.334,-2.54 5.334,-2.54 5.334,2.54 -5.334,2.54 -5.334,-2.54
3D body "User Library-PBD_(DS1023-2)_2line_connectors_h=5_0_8_5mm_step_2_54mm.step": height 8.5, standoff -3, extent -5.33,-2.48 5.33,2.52
3D body "SIM800_adapter.step": height 22, standoff 2.49, extent -6,-5.25 38.5,49.75

## PICO [mm]
pads (49):
  rect 3.2x1.6 smd: 1(0.81,49.63) 2(0.81,47.09) 3(0.81,44.55) 4(0.81,42.01) 5(0.81,39.47) 6(0.81,36.93) 7(0.81,34.39) 8(0.81,31.85) 9(0.81,29.31) 10(0.81,26.77) 11(0.81,24.23) 12(0.81,21.69) 13(0.81,19.15) 14(0.81,16.61) 15(0.81,14.07) 16(0.81,11.53) 17(0.81,8.99) 18(0.81,6.45) 19(0.81,3.91) 20(0.81,1.37) 21(20.19,1.37) 22(20.19,3.91) 23(20.19,6.45) 24(20.19,8.99) 25(20.19,11.53) 26(20.19,14.07) 27(20.19,16.61) 28(20.19,19.15) 29(20.19,21.69) 30(20.19,24.23) 31(20.19,26.77) 32(20.19,29.31) 33(20.19,31.85) 34(20.19,34.39) 35(20.19,36.93) 36(20.19,39.47) 37(20.19,42.01) 38(20.19,44.55) 39(20.19,47.09) 40(20.19,49.63)
  rect 1.6x3.2 smd: D1(7.96,0.8) D2(10.5,0.8) D3(13.04,0.8)
  rect 1.5x1.5 smd: TP1(10.5,46.5) TP2(11.5,49.8) TP3(9.5,49.8) TP4(8,43) TP5(8,40.5) TP6(8,38)
Top Overlay:
  lines w0.1: 0,0 6.5,0 0,0 ; 0,51 21,51 0,51 ; 14.75,0 21,0 14.75,0
  lines w0.2: -1.6,49.7 ccw(c-1.55,49.7) -1.5,49.7 ; -1.6,49.7 cw(c-1.55,49.7) -1.5,49.7 ; -1.6,49.7 ccw(c-1.55,49.7) -1.5,49.7
Mechanical 13:
  lines w0.2: 0,0 21,0 21,51 0,51 0,0
Mechanical 15:
  lines w0.1: -1.79,-1.8 22.79,-1.8 22.79,52 -1.79,52 -1.79,-1.8
3D body "PICO.stp": height 3.69, standoff 0, extent 0,0.03 21,52.456

## RPI_CM4_con [mm] "only connectors"
pads (204):
  rect 0.7x0.2 smd: 1(-2,31.3) 2(1.08,31.3) 3(-2,30.9) 4(1.08,30.9) 5(-2,30.5) 6(1.08,30.5) 7(-2,30.1) 8(1.08,30.1) 9(-2,29.7) 10(1.08,29.7) 11(-2,29.3) 12(1.08,29.3) 13(-2,28.9) 14(1.08,28.9) 15(-2,28.5) 16(1.08,28.5) 17(-2,28.1) 18(1.08,28.1) 19(-2,27.7) 20(1.08,27.7) 21(-2,27.3) 22(1.08,27.3) 23(-2,26.9) 24(1.08,26.9) 25(-2,26.5) 26(1.08,26.5) 27(-2,26.1) 28(1.08,26.1) 29(-2,25.7) 30(1.08,25.7) 31(-2,25.3) 32(1.08,25.3) 33(-2,24.9) 34(1.08,24.9) 35(-2,24.5) 36(1.08,24.5) 37(-2,24.1) 38(1.08,24.1) 39(-2,23.7) 40(1.08,23.7) 41(-2,23.3) 42(1.08,23.3) 43(-2,22.9) 44(1.08,22.9) 45(-2,22.5) 46(1.08,22.5) 47(-2,22.1) 48(1.08,22.1) 49(-2,21.7) 50(1.08,21.7) 51(-2,21.3) 52(1.08,21.3) 53(-2,20.9) 54(1.08,20.9) 55(-2,20.5) 56(1.08,20.5) 57(-2,20.1) 58(1.08,20.1) 59(-2,19.7) 60(1.08,19.7) 61(-2,19.3) 62(1.08,19.3) 63(-2,18.9) 64(1.08,18.9) 65(-2,18.5) 66(1.08,18.5) 67(-2,18.1) 68(1.08,18.1) 69(-2,17.7) 70(1.08,17.7) 71(-2,17.3) 72(1.08,17.3) 73(-2,16.9) 74(1.08,16.9) 75(-2,16.5) 76(1.08,16.5) 77(-2,16.1) 78(1.08,16.1) 79(-2,15.7) 80(1.08,15.7) 81(-2,15.3) 82(1.08,15.3) 83(-2,14.9) 84(1.08,14.9) 85(-2,14.5) 86(1.08,14.5) 87(-2,14.1) 88(1.08,14.1) 89(-2,13.7) 90(1.08,13.7) 91(-2,13.3) 92(1.08,13.3) 93(-2,12.9) 94(1.08,12.9) 95(-2,12.5) 96(1.08,12.5) 97(-2,12.1) 98(1.08,12.1) 99(-2,11.7) 100(1.08,11.7) 101(31.92,31.3) 102(35,31.3) 103(31.92,30.9) 104(35,30.9) 105(31.92,30.5) 106(35,30.5) 107(31.92,30.1) 108(35,30.1) 109(31.92,29.7) 110(35,29.7) 111(31.92,29.3) 112(35,29.3) 113(31.92,28.9) 114(35,28.9) 115(31.92,28.5) 116(35,28.5) 117(31.92,28.1) 118(35,28.1) 119(31.92,27.7) 120(35,27.7) 121(31.92,27.3) 122(35,27.3) 123(31.92,26.9) 124(35,26.9) 125(31.92,26.5) 126(35,26.5) 127(31.92,26.1) 128(35,26.1) 129(31.92,25.7) 130(35,25.7) 131(31.92,25.3) 132(35,25.3) 133(31.92,24.9) 134(35,24.9) 135(31.92,24.5) 136(35,24.5) 137(31.92,24.1) 138(35,24.1) 139(31.92,23.7) 140(35,23.7) 141(31.92,23.3) 142(35,23.3) 143(31.92,22.9) 144(35,22.9) 145(31.92,22.5) 146(35,22.5) 147(31.92,22.1) 148(35,22.1) 149(31.92,21.7) 150(35,21.7) 151(31.92,21.3) 152(35,21.3) 153(31.92,20.9) 154(35,20.9) 155(31.92,20.5) 156(35,20.5) 157(31.92,20.1) 158(35,20.1) 159(31.92,19.7) 160(35,19.7) 161(31.92,19.3) 162(35,19.3) 163(31.92,18.9) 164(35,18.9) 165(31.92,18.5) 166(35,18.5) 167(31.92,18.1) 168(35,18.1) 169(31.92,17.7) 170(35,17.7) 171(31.92,17.3) 172(35,17.3) 173(31.92,16.9) 174(35,16.9) 175(31.92,16.5) 176(35,16.5) 177(31.92,16.1) 178(35,16.1) 179(31.92,15.7) 180(35,15.7) 181(31.92,15.3) 182(35,15.3) 183(31.92,14.9) 184(35,14.9) 185(31.92,14.5) 186(35,14.5) 187(31.92,14.1) 188(35,14.1) 189(31.92,13.7) 190(35,13.7) 191(31.92,13.3) 192(35,13.3) 193(31.92,12.9) 194(35,12.9) 195(31.92,12.5) 196(35,12.5) 197(31.92,12.1) 198(35,12.1) 199(31.92,11.7) 200(35,11.7)
  round 2.7 hole 2.7: Un1(0,0) Un2(33,0) Un3(0,48) Un4(33,48)
Top Overlay:
  lines w0.2: -3.5,0 -3.5,48 ; -2.475,-2.475 cw(c0,0) 2.475,-2.475 ; -2.475,50.475 ccw(c0,48) 2.475,50.475 ; -2.35,11.1 -2.35,10.1 1.43,10.1 1.43,11.1 ; -2.35,32.9 1.43,32.9 ; 30.525,-2.475 cw(c33,0) 35.475,-2.475 ; 30.525,50.475 ccw(c33,48) 35.475,50.475 ; 31.57,11.1 31.57,10.1 35.35,10.1 35.35,11.1 ; 31.57,31.9 31.57,32.9 35.35,32.9 35.35,31.9 ; 36.5,0 36.5,47.632
  text "199" at 29,10.5 h2
  text "101" at 29,31.25 h2
  text "100" at 2,10.5 h2
  text "2" at 2.25,31.25 h2
Top Designator:
  lines w0.12: -2.35,10.1 -2.35,32.9 1.43,32.9 1.43,10.1 -2.35,10.1 ; 31.57,10.1 35.35,10.1 35.35,32.9 31.57,32.9 31.57,10.1
3D body "DF40HC(3.0)-100DS-0.4V.stp": height -0.38, standoff -3.28, extent 31.785,10.2 35.165,32.8
3D body "DF40HC(3.0)-100DS-0.4V.stp": height -0.38, standoff -3.28, extent -2.19,10.2 1.19,32.8

## RPI_CM4_full [mm] "with CM4 3D"
pads (204):
  rect 0.7x0.2 smd: 1(-2,31.3) 2(1.08,31.3) 3(-2,30.9) 4(1.08,30.9) 5(-2,30.5) 6(1.08,30.5) 7(-2,30.1) 8(1.08,30.1) 9(-2,29.7) 10(1.08,29.7) 11(-2,29.3) 12(1.08,29.3) 13(-2,28.9) 14(1.08,28.9) 15(-2,28.5) 16(1.08,28.5) 17(-2,28.1) 18(1.08,28.1) 19(-2,27.7) 20(1.08,27.7) 21(-2,27.3) 22(1.08,27.3) 23(-2,26.9) 24(1.08,26.9) 25(-2,26.5) 26(1.08,26.5) 27(-2,26.1) 28(1.08,26.1) 29(-2,25.7) 30(1.08,25.7) 31(-2,25.3) 32(1.08,25.3) 33(-2,24.9) 34(1.08,24.9) 35(-2,24.5) 36(1.08,24.5) 37(-2,24.1) 38(1.08,24.1) 39(-2,23.7) 40(1.08,23.7) 41(-2,23.3) 42(1.08,23.3) 43(-2,22.9) 44(1.08,22.9) 45(-2,22.5) 46(1.08,22.5) 47(-2,22.1) 48(1.08,22.1) 49(-2,21.7) 50(1.08,21.7) 51(-2,21.3) 52(1.08,21.3) 53(-2,20.9) 54(1.08,20.9) 55(-2,20.5) 56(1.08,20.5) 57(-2,20.1) 58(1.08,20.1) 59(-2,19.7) 60(1.08,19.7) 61(-2,19.3) 62(1.08,19.3) 63(-2,18.9) 64(1.08,18.9) 65(-2,18.5) 66(1.08,18.5) 67(-2,18.1) 68(1.08,18.1) 69(-2,17.7) 70(1.08,17.7) 71(-2,17.3) 72(1.08,17.3) 73(-2,16.9) 74(1.08,16.9) 75(-2,16.5) 76(1.08,16.5) 77(-2,16.1) 78(1.08,16.1) 79(-2,15.7) 80(1.08,15.7) 81(-2,15.3) 82(1.08,15.3) 83(-2,14.9) 84(1.08,14.9) 85(-2,14.5) 86(1.08,14.5) 87(-2,14.1) 88(1.08,14.1) 89(-2,13.7) 90(1.08,13.7) 91(-2,13.3) 92(1.08,13.3) 93(-2,12.9) 94(1.08,12.9) 95(-2,12.5) 96(1.08,12.5) 97(-2,12.1) 98(1.08,12.1) 99(-2,11.7) 100(1.08,11.7) 101(31.92,31.3) 102(35,31.3) 103(31.92,30.9) 104(35,30.9) 105(31.92,30.5) 106(35,30.5) 107(31.92,30.1) 108(35,30.1) 109(31.92,29.7) 110(35,29.7) 111(31.92,29.3) 112(35,29.3) 113(31.92,28.9) 114(35,28.9) 115(31.92,28.5) 116(35,28.5) 117(31.92,28.1) 118(35,28.1) 119(31.92,27.7) 120(35,27.7) 121(31.92,27.3) 122(35,27.3) 123(31.92,26.9) 124(35,26.9) 125(31.92,26.5) 126(35,26.5) 127(31.92,26.1) 128(35,26.1) 129(31.92,25.7) 130(35,25.7) 131(31.92,25.3) 132(35,25.3) 133(31.92,24.9) 134(35,24.9) 135(31.92,24.5) 136(35,24.5) 137(31.92,24.1) 138(35,24.1) 139(31.92,23.7) 140(35,23.7) 141(31.92,23.3) 142(35,23.3) 143(31.92,22.9) 144(35,22.9) 145(31.92,22.5) 146(35,22.5) 147(31.92,22.1) 148(35,22.1) 149(31.92,21.7) 150(35,21.7) 151(31.92,21.3) 152(35,21.3) 153(31.92,20.9) 154(35,20.9) 155(31.92,20.5) 156(35,20.5) 157(31.92,20.1) 158(35,20.1) 159(31.92,19.7) 160(35,19.7) 161(31.92,19.3) 162(35,19.3) 163(31.92,18.9) 164(35,18.9) 165(31.92,18.5) 166(35,18.5) 167(31.92,18.1) 168(35,18.1) 169(31.92,17.7) 170(35,17.7) 171(31.92,17.3) 172(35,17.3) 173(31.92,16.9) 174(35,16.9) 175(31.92,16.5) 176(35,16.5) 177(31.92,16.1) 178(35,16.1) 179(31.92,15.7) 180(35,15.7) 181(31.92,15.3) 182(35,15.3) 183(31.92,14.9) 184(35,14.9) 185(31.92,14.5) 186(35,14.5) 187(31.92,14.1) 188(35,14.1) 189(31.92,13.7) 190(35,13.7) 191(31.92,13.3) 192(35,13.3) 193(31.92,12.9) 194(35,12.9) 195(31.92,12.5) 196(35,12.5) 197(31.92,12.1) 198(35,12.1) 199(31.92,11.7) 200(35,11.7)
  round 2.7 hole 2.7: Un1(0,0) Un2(33,0) Un3(0,48) Un4(33,48)
Top Overlay:
  lines w0.2: -3.5,0 -3.5,48 ; -2.475,-2.475 cw(c0,0) 2.475,-2.475 ; -2.475,50.475 ccw(c0,48) 2.475,50.475 ; -2.35,11.1 -2.35,10.1 1.43,10.1 1.43,11.1 ; -2.35,32.9 1.43,32.9 ; 30.525,-2.475 cw(c33,0) 35.475,-2.475 ; 30.525,50.475 ccw(c33,48) 35.475,50.475 ; 31.57,11.1 31.57,10.1 35.35,10.1 35.35,11.1 ; 31.57,31.9 31.57,32.9 35.35,32.9 35.35,31.9 ; 36.5,0 36.5,47.632
  text "199" at 29,10.5 h2
  text "101" at 29,31.25 h2
  text "100" at 2,10.5 h2
  text "2" at 2.25,31.25 h2
Top Designator:
  lines w0.12: -2.35,10.1 -2.35,32.9 1.43,32.9 1.43,10.1 -2.35,10.1 ; 31.57,10.1 35.35,10.1 35.35,32.9 31.57,32.9 31.57,10.1
3D body "DF40HC(3.0)-100DS-0.4V.stp": height -0.38, standoff -3.28, extent -2.19,10.2 1.19,32.8
3D body "DF40HC(3.0)-100DS-0.4V.stp": height -0.38, standoff -3.28, extent 31.785,10.2 35.165,32.8
3D body "CM4.step": height 6.85, standoff 2.07, extent -3.5,-3.5 36.5,51.5

## RPI_CM4_STACKED [mm] "with CM4 3D"
pads (200):
  rect 0.7x0.2 smd: 1(-2,31.3) 2(1.08,31.3) 3(-2,30.9) 4(1.08,30.9) 5(-2,30.5) 6(1.08,30.5) 7(-2,30.1) 8(1.08,30.1) 9(-2,29.7) 10(1.08,29.7) 11(-2,29.3) 12(1.08,29.3) 13(-2,28.9) 14(1.08,28.9) 15(-2,28.5) 16(1.08,28.5) 17(-2,28.1) 18(1.08,28.1) 19(-2,27.7) 20(1.08,27.7) 21(-2,27.3) 22(1.08,27.3) 23(-2,26.9) 24(1.08,26.9) 25(-2,26.5) 26(1.08,26.5) 27(-2,26.1) 28(1.08,26.1) 29(-2,25.7) 30(1.08,25.7) 31(-2,25.3) 32(1.08,25.3) 33(-2,24.9) 34(1.08,24.9) 35(-2,24.5) 36(1.08,24.5) 37(-2,24.1) 38(1.08,24.1) 39(-2,23.7) 40(1.08,23.7) 41(-2,23.3) 42(1.08,23.3) 43(-2,22.9) 44(1.08,22.9) 45(-2,22.5) 46(1.08,22.5) 47(-2,22.1) 48(1.08,22.1) 49(-2,21.7) 50(1.08,21.7) 51(-2,21.3) 52(1.08,21.3) 53(-2,20.9) 54(1.08,20.9) 55(-2,20.5) 56(1.08,20.5) 57(-2,20.1) 58(1.08,20.1) 59(-2,19.7) 60(1.08,19.7) 61(-2,19.3) 62(1.08,19.3) 63(-2,18.9) 64(1.08,18.9) 65(-2,18.5) 66(1.08,18.5) 67(-2,18.1) 68(1.08,18.1) 69(-2,17.7) 70(1.08,17.7) 71(-2,17.3) 72(1.08,17.3) 73(-2,16.9) 74(1.08,16.9) 75(-2,16.5) 76(1.08,16.5) 77(-2,16.1) 78(1.08,16.1) 79(-2,15.7) 80(1.08,15.7) 81(-2,15.3) 82(1.08,15.3) 83(-2,14.9) 84(1.08,14.9) 85(-2,14.5) 86(1.08,14.5) 87(-2,14.1) 88(1.08,14.1) 89(-2,13.7) 90(1.08,13.7) 91(-2,13.3) 92(1.08,13.3) 93(-2,12.9) 94(1.08,12.9) 95(-2,12.5) 96(1.08,12.5) 97(-2,12.1) 98(1.08,12.1) 99(-2,11.7) 100(1.08,11.7) 101(31.92,31.3) 102(35,31.3) 103(31.92,30.9) 104(35,30.9) 105(31.92,30.5) 106(35,30.5) 107(31.92,30.1) 108(35,30.1) 109(31.92,29.7) 110(35,29.7) 111(31.92,29.3) 112(35,29.3) 113(31.92,28.9) 114(35,28.9) 115(31.92,28.5) 116(35,28.5) 117(31.92,28.1) 118(35,28.1) 119(31.92,27.7) 120(35,27.7) 121(31.92,27.3) 122(35,27.3) 123(31.92,26.9) 124(35,26.9) 125(31.92,26.5) 126(35,26.5) 127(31.92,26.1) 128(35,26.1) 129(31.92,25.7) 130(35,25.7) 131(31.92,25.3) 132(35,25.3) 133(31.92,24.9) 134(35,24.9) 135(31.92,24.5) 136(35,24.5) 137(31.92,24.1) 138(35,24.1) 139(31.92,23.7) 140(35,23.7) 141(31.92,23.3) 142(35,23.3) 143(31.92,22.9) 144(35,22.9) 145(31.92,22.5) 146(35,22.5) 147(31.92,22.1) 148(35,22.1) 149(31.92,21.7) 150(35,21.7) 151(31.92,21.3) 152(35,21.3) 153(31.92,20.9) 154(35,20.9) 155(31.92,20.5) 156(35,20.5) 157(31.92,20.1) 158(35,20.1) 159(31.92,19.7) 160(35,19.7) 161(31.92,19.3) 162(35,19.3) 163(31.92,18.9) 164(35,18.9) 165(31.92,18.5) 166(35,18.5) 167(31.92,18.1) 168(35,18.1) 169(31.92,17.7) 170(35,17.7) 171(31.92,17.3) 172(35,17.3) 173(31.92,16.9) 174(35,16.9) 175(31.92,16.5) 176(35,16.5) 177(31.92,16.1) 178(35,16.1) 179(31.92,15.7) 180(35,15.7) 181(31.92,15.3) 182(35,15.3) 183(31.92,14.9) 184(35,14.9) 185(31.92,14.5) 186(35,14.5) 187(31.92,14.1) 188(35,14.1) 189(31.92,13.7) 190(35,13.7) 191(31.92,13.3) 192(35,13.3) 193(31.92,12.9) 194(35,12.9) 195(31.92,12.5) 196(35,12.5) 197(31.92,12.1) 198(35,12.1) 199(31.92,11.7) 200(35,11.7)
Top Layer:
  pour cut-out: 0,44.464 -0.232,44.464 -0.691,44.525 -1.139,44.645 -1.567,44.822 -1.968,45.054 -2.336,45.336 -2.664,45.664 -2.946,46.032 -3.178,46.433 -3.355,46.861 -3.475,47.309 -3.536,47.768 -3.536,48 -3.536,48.232 -3.475,48.691 -3.355,49.139 -3.178,49.567 -2.946,49.968 -2.664,50.336 -2.336,50.664 -1.968,50.946 -1.567,51.178 -1.139,51.355 -0.691,51.475 -0.232,51.536 0,51.536 0.232,51.536 0.691,51.475 1.139,51.355 1.567,51.178 1.968,50.946 2.336,50.664 2.664,50.336 2.946,49.968 3.178,49.567 3.355,49.139 3.475,48.691 3.536,48.232 3.536,48 3.536,47.768 3.475,47.309 3.355,46.861 3.178,46.433 2.946,46.032 2.664,45.664 2.336,45.336 1.968,45.054 1.567,44.822 1.139,44.645 0.691,44.525 0.232,44.464
  pour cut-out: 33,44.464 32.768,44.464 32.309,44.525 31.861,44.645 31.433,44.822 31.032,45.054 30.664,45.336 30.336,45.664 30.054,46.032 29.822,46.433 29.645,46.861 29.525,47.309 29.464,47.768 29.464,48 29.464,48.232 29.525,48.691 29.645,49.139 29.822,49.567 30.054,49.968 30.336,50.336 30.664,50.664 31.032,50.946 31.433,51.178 31.861,51.355 32.309,51.475 32.768,51.536 33,51.536 33.232,51.536 33.691,51.475 34.139,51.355 34.567,51.178 34.968,50.946 35.336,50.664 35.664,50.336 35.946,49.968 36.178,49.567 36.355,49.139 36.475,48.691 36.536,48.232 36.536,48 36.536,47.768 36.475,47.309 36.355,46.861 36.178,46.433 35.946,46.032 35.664,45.664 35.336,45.336 34.968,45.054 34.567,44.822 34.139,44.645 33.691,44.525 33.232,44.464
  pour cut-out: 33,-3.536 32.768,-3.536 32.309,-3.475 31.861,-3.355 31.433,-3.178 31.032,-2.946 30.664,-2.664 30.336,-2.336 30.054,-1.968 29.822,-1.567 29.645,-1.139 29.525,-0.691 29.464,-0.232 29.464,0 29.464,0.232 29.525,0.691 29.645,1.139 29.822,1.567 30.054,1.968 30.336,2.336 30.664,2.664 31.032,2.946 31.433,3.178 31.861,3.355 32.309,3.475 32.768,3.536 33,3.536 33.232,3.536 33.691,3.475 34.139,3.355 34.567,3.178 34.968,2.946 35.336,2.664 35.664,2.336 35.946,1.968 36.178,1.567 36.355,1.139 36.475,0.691 36.536,0.232 36.536,0 36.536,-0.232 36.475,-0.691 36.355,-1.139 36.178,-1.567 35.946,-1.968 35.664,-2.336 35.336,-2.664 34.968,-2.946 34.567,-3.178 34.139,-3.355 33.691,-3.475 33.232,-3.536
  pour cut-out: 0,-3.536 -0.232,-3.536 -0.691,-3.475 -1.139,-3.355 -1.567,-3.178 -1.968,-2.946 -2.336,-2.664 -2.664,-2.336 -2.946,-1.968 -3.178,-1.567 -3.355,-1.139 -3.475,-0.691 -3.536,-0.232 -3.536,0 -3.536,0.232 -3.475,0.691 -3.355,1.139 -3.178,1.567 -2.946,1.968 -2.664,2.336 -2.336,2.664 -1.968,2.946 -1.567,3.178 -1.139,3.355 -0.691,3.475 -0.232,3.536 0,3.536 0.232,3.536 0.691,3.475 1.139,3.355 1.567,3.178 1.968,2.946 2.336,2.664 2.664,2.336 2.946,1.968 3.178,1.567 3.355,1.139 3.475,0.691 3.536,0.232 3.536,0 3.536,-0.232 3.475,-0.691 3.355,-1.139 3.178,-1.567 2.946,-1.968 2.664,-2.336 2.336,-2.664 1.968,-2.946 1.567,-3.178 1.139,-3.355 0.691,-3.475 0.232,-3.536
Bottom Layer:
  pour cut-out: 0,44.464 -0.232,44.464 -0.691,44.525 -1.139,44.645 -1.567,44.822 -1.968,45.054 -2.336,45.336 -2.664,45.664 -2.946,46.032 -3.178,46.433 -3.355,46.861 -3.475,47.309 -3.536,47.768 -3.536,48 -3.536,48.232 -3.475,48.691 -3.355,49.139 -3.178,49.567 -2.946,49.968 -2.664,50.336 -2.336,50.664 -1.968,50.946 -1.567,51.178 -1.139,51.355 -0.691,51.475 -0.232,51.536 0,51.536 0.232,51.536 0.691,51.475 1.139,51.355 1.567,51.178 1.968,50.946 2.336,50.664 2.664,50.336 2.946,49.968 3.178,49.567 3.355,49.139 3.475,48.691 3.536,48.232 3.536,48 3.536,47.768 3.475,47.309 3.355,46.861 3.178,46.433 2.946,46.032 2.664,45.664 2.336,45.336 1.968,45.054 1.567,44.822 1.139,44.645 0.691,44.525 0.232,44.464
  pour cut-out: 33,44.464 32.768,44.464 32.309,44.525 31.861,44.645 31.433,44.822 31.032,45.054 30.664,45.336 30.336,45.664 30.054,46.032 29.822,46.433 29.645,46.861 29.525,47.309 29.464,47.768 29.464,48 29.464,48.232 29.525,48.691 29.645,49.139 29.822,49.567 30.054,49.968 30.336,50.336 30.664,50.664 31.032,50.946 31.433,51.178 31.861,51.355 32.309,51.475 32.768,51.536 33,51.536 33.232,51.536 33.691,51.475 34.139,51.355 34.567,51.178 34.968,50.946 35.336,50.664 35.664,50.336 35.946,49.968 36.178,49.567 36.355,49.139 36.475,48.691 36.536,48.232 36.536,48 36.536,47.768 36.475,47.309 36.355,46.861 36.178,46.433 35.946,46.032 35.664,45.664 35.336,45.336 34.968,45.054 34.567,44.822 34.139,44.645 33.691,44.525 33.232,44.464
  pour cut-out: 33,-3.536 32.768,-3.536 32.309,-3.475 31.861,-3.355 31.433,-3.178 31.032,-2.946 30.664,-2.664 30.336,-2.336 30.054,-1.968 29.822,-1.567 29.645,-1.139 29.525,-0.691 29.464,-0.232 29.464,0 29.464,0.232 29.525,0.691 29.645,1.139 29.822,1.567 30.054,1.968 30.336,2.336 30.664,2.664 31.032,2.946 31.433,3.178 31.861,3.355 32.309,3.475 32.768,3.536 33,3.536 33.232,3.536 33.691,3.475 34.139,3.355 34.567,3.178 34.968,2.946 35.336,2.664 35.664,2.336 35.946,1.968 36.178,1.567 36.355,1.139 36.475,0.691 36.536,0.232 36.536,0 36.536,-0.232 36.475,-0.691 36.355,-1.139 36.178,-1.567 35.946,-1.968 35.664,-2.336 35.336,-2.664 34.968,-2.946 34.567,-3.178 34.139,-3.355 33.691,-3.475 33.232,-3.536
  pour cut-out: 0,-3.536 -0.232,-3.536 -0.691,-3.475 -1.139,-3.355 -1.567,-3.178 -1.968,-2.946 -2.336,-2.664 -2.664,-2.336 -2.946,-1.968 -3.178,-1.567 -3.355,-1.139 -3.475,-0.691 -3.536,-0.232 -3.536,0 -3.536,0.232 -3.475,0.691 -3.355,1.139 -3.178,1.567 -2.946,1.968 -2.664,2.336 -2.336,2.664 -1.968,2.946 -1.567,3.178 -1.139,3.355 -0.691,3.475 -0.232,3.536 0,3.536 0.232,3.536 0.691,3.475 1.139,3.355 1.567,3.178 1.968,2.946 2.336,2.664 2.664,2.336 2.946,1.968 3.178,1.567 3.355,1.139 3.475,0.691 3.536,0.232 3.536,0 3.536,-0.232 3.475,-0.691 3.355,-1.139 3.178,-1.567 2.946,-1.968 2.664,-2.336 2.336,-2.664 1.968,-2.946 1.567,-3.178 1.139,-3.355 0.691,-3.475 0.232,-3.536
Top Overlay:
  lines w0.2: -3.5,0 -3.5,48 ; -2.475,-2.475 cw(c0,0) 2.475,-2.475 ; -2.475,50.475 ccw(c0,48) 2.475,50.475 ; -2.35,11.1 -2.35,10.1 1.43,10.1 1.43,11.1 ; -2.35,32.9 1.43,32.9 ; 30.525,-2.475 cw(c33,0) 35.475,-2.475 ; 30.525,50.475 ccw(c33,48) 35.475,50.475 ; 31.57,11.1 31.57,10.1 35.35,10.1 35.35,11.1 ; 31.57,31.9 31.57,32.9 35.35,32.9 35.35,31.9 ; 36.5,0 36.5,47.632
  text "199" at 29,10.5 h2
  text "101" at 29,31.25 h2
  text "100" at 2,10.5 h2
  text "2" at 2.25,31.25 h2
Keep-Out Layer:
  board cut-out: 0,-1.4 -0.138,-1.4 -0.408,-1.346 -0.663,-1.241 -0.892,-1.087 -1.087,-0.892 -1.241,-0.663 -1.346,-0.408 -1.4,-0.138 -1.4,0 -1.4,0.138 -1.346,0.408 -1.241,0.663 -1.087,0.892 -0.892,1.087 -0.663,1.241 -0.408,1.346 -0.138,1.4 0,1.4 0.138,1.4 0.408,1.346 0.663,1.241 0.892,1.087 1.087,0.892 1.241,0.663 1.346,0.408 1.4,0.138 1.4,0 1.4,-0.138 1.346,-0.408 1.241,-0.663 1.087,-0.892 0.892,-1.087 0.663,-1.241 0.408,-1.346 0.138,-1.4
  board cut-out: 33,-1.4 32.862,-1.4 32.592,-1.346 32.337,-1.241 32.108,-1.087 31.913,-0.892 31.759,-0.663 31.654,-0.408 31.6,-0.138 31.6,0 31.6,0.138 31.654,0.408 31.759,0.663 31.913,0.892 32.108,1.087 32.337,1.241 32.592,1.346 32.862,1.4 33,1.4 33.138,1.4 33.408,1.346 33.663,1.241 33.892,1.087 34.087,0.892 34.241,0.663 34.346,0.408 34.4,0.138 34.4,0 34.4,-0.138 34.346,-0.408 34.241,-0.663 34.087,-0.892 33.892,-1.087 33.663,-1.241 33.408,-1.346 33.138,-1.4
  board cut-out: 33,46.6 32.862,46.6 32.592,46.654 32.337,46.759 32.108,46.913 31.913,47.108 31.759,47.337 31.654,47.592 31.6,47.862 31.6,48 31.6,48.138 31.654,48.408 31.759,48.663 31.913,48.892 32.108,49.087 32.337,49.241 32.592,49.346 32.862,49.4 33,49.4 33.138,49.4 33.408,49.346 33.663,49.241 33.892,49.087 34.087,48.892 34.241,48.663 34.346,48.408 34.4,48.138 34.4,48 34.4,47.862 34.346,47.592 34.241,47.337 34.087,47.108 33.892,46.913 33.663,46.759 33.408,46.654 33.138,46.6
  board cut-out: 0,46.6 -0.138,46.6 -0.408,46.654 -0.663,46.759 -0.892,46.913 -1.087,47.108 -1.241,47.337 -1.346,47.592 -1.4,47.862 -1.4,48 -1.4,48.138 -1.346,48.408 -1.241,48.663 -1.087,48.892 -0.892,49.087 -0.663,49.241 -0.408,49.346 -0.138,49.4 0,49.4 0.138,49.4 0.408,49.346 0.663,49.241 0.892,49.087 1.087,48.892 1.241,48.663 1.346,48.408 1.4,48.138 1.4,48 1.4,47.862 1.346,47.592 1.241,47.337 1.087,47.108 0.892,46.913 0.663,46.759 0.408,46.654 0.138,46.6
Top Designator:
  lines w0.12: -2.35,10.1 -2.35,32.9 1.43,32.9 1.43,10.1 -2.35,10.1 ; 31.57,10.1 35.35,10.1 35.35,32.9 31.57,32.9 31.57,10.1
3D body "DF40HC(3.0)-100DS-0.4V.stp": height -0.38, standoff -3.28, extent -2.19,10.2 1.19,32.8
3D body "DF40HC(3.0)-100DS-0.4V.stp": height -0.38, standoff -3.28, extent 31.785,10.2 35.165,32.8
3D body "Time4CM4_Riser.step": height 7.87, standoff 2, extent -3.556,-3.703 36.441,51.455